# Altium footprint library Connector Power.PcbLib: 83 footprints (part 4 of 6)
Each footprint in its own frame and in the unit in brackets; x right, y up, seen from the top. Pads: shape width x height; smd on the part's side, far side on the other; paste and mask are expansions set on the pad; w line width, h text height; cw(c..) or ccw(c..) is an arc to the next point about the centre after c.
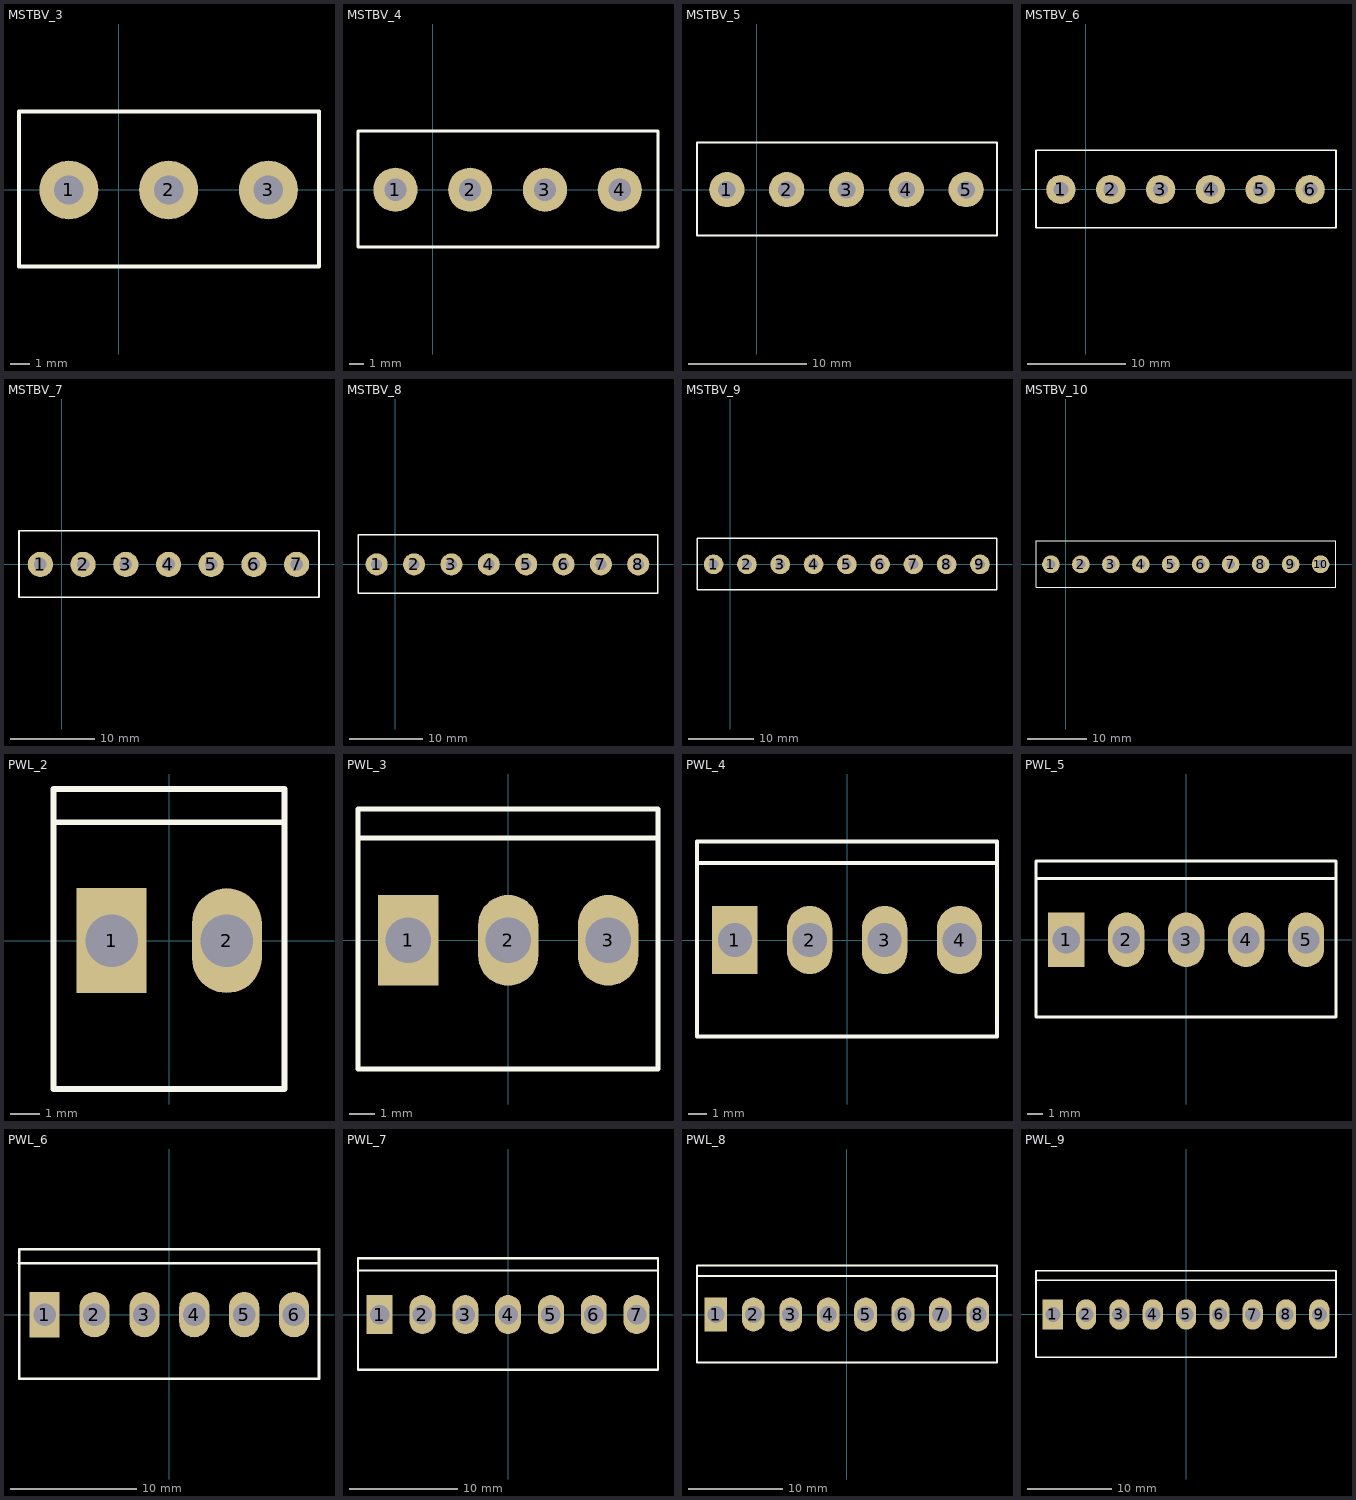
[diagram p3: the footprints below, top view; thin cyan lines are the x and y axes]

## MSTBV_3 [mm] "PHOENIX MSTBV 2.5/3-GF-5.08"
pads (3):
  round 3 hole 1.5: 1(-2.54,0) 2(2.54,0) 3(7.62,0)
Top Overlay:
  lines w0.2: -5.08,-3.9 10.2,-3.9 10.2,4 -5.08,4 -5.08,-3.9
3D body "1753437.stp": height 12.1, standoff -3.8, extent 0.08,-3.8 10.08,4.8
3D body "1753437.stp": height 12.1, standoff -3.8, extent -5,-3.8 5,4.8

## MSTBV_4 [mm] "PHOENIX MSTBV 2.5/4-GF-5.08"
pads (4):
  round 3 hole 1.5: 1(-2.54,0) 2(2.54,0) 3(7.62,0) 4(12.7,0)
Top Overlay:
  lines w0.2: -5.08,-3.9 15.3,-3.9 15.3,4 -5.08,4 -5.08,-3.9
3D body "1753437.stp": height 12.1, standoff -3.8, extent 0.08,-3.8 10.08,4.8
3D body "1753437.stp": height 12.1, standoff -3.8, extent -5,-3.8 5,4.8
3D body "1753437.stp": height 12.1, standoff -3.8, extent 5.16,-3.8 15.16,4.8

## MSTBV_5 [mm] "PHOENIX MSTBV 2.5/5-GF-5.08"
pads (5):
  round 3 hole 1.5: 1(-2.54,0) 2(2.54,0) 3(7.62,0) 4(12.7,0) 5(17.78,0)
Top Overlay:
  lines w0.2: -5.08,-3.9 -5.08,4 20.4,4 20.4,-3.9 -5.08,-3.9
3D body "1753437.stp": height 12.1, standoff -3.8, extent 10.24,-3.8 20.24,4.8
3D body "1753437.stp": height 12.1, standoff -3.8, extent 5.16,-3.8 15.16,4.8
3D body "1753437.stp": height 12.1, standoff -3.8, extent -5,-3.8 5,4.8
3D body "1753437.stp": height 12.1, standoff -3.8, extent 0.08,-3.8 10.08,4.8

## MSTBV_6 [mm] "PHOENIX MSTBV 2.5/6-GF-5.08"
pads (6):
  round 3 hole 1.5: 1(-2.54,0) 2(2.54,0) 3(7.62,0) 4(12.7,0) 5(17.78,0) 6(22.86,0)
Top Overlay:
  lines w0.2: -5.08,-3.9 25.5,-3.9 25.5,4 -5.08,4 -5.08,-3.9
3D body "1753437.stp": height 12.1, standoff -3.8, extent 0.08,-3.8 10.08,4.8
3D body "1753437.stp": height 12.1, standoff -3.8, extent -5,-3.8 5,4.8
3D body "1753437.stp": height 12.1, standoff -3.8, extent 5.16,-3.8 15.16,4.8
3D body "1753437.stp": height 12.1, standoff -3.8, extent 10.24,-3.8 20.24,4.8
3D body "1753437.stp": height 12.1, standoff -3.8, extent 15.32,-3.8 25.32,4.8

## MSTBV_7 [mm] "PHOENIX MSTBV 2.5/7-GF-5.08"
pads (7):
  round 3 hole 1.5: 1(-2.54,0) 2(2.54,0) 3(7.62,0) 4(12.7,0) 5(17.78,0) 6(22.86,0) 7(27.94,0)
Top Overlay:
  lines w0.2: -5.08,-3.9 30.6,-3.9 30.6,4 -5.08,4 -5.08,-3.9
3D body "1753437.stp": height 12.1, standoff -3.8, extent 20.4,-3.8 30.4,4.8
3D body "1753437.stp": height 12.1, standoff -3.8, extent 0.08,-3.8 10.08,4.8
3D body "1753437.stp": height 12.1, standoff -3.8, extent -5,-3.8 5,4.8
3D body "1753437.stp": height 12.1, standoff -3.8, extent 5.16,-3.8 15.16,4.8
3D body "1753437.stp": height 12.1, standoff -3.8, extent 10.24,-3.8 20.24,4.8
3D body "1753437.stp": height 12.1, standoff -3.8, extent 15.32,-3.8 25.32,4.8

## MSTBV_8 [mm] "PHOENIX MSTBV 2.5/8-GF-5.08"
pads (8):
  round 3 hole 1.5: 1(-2.54,0) 2(2.54,0) 3(7.62,0) 4(12.7,0) 5(17.78,0) 6(22.86,0) 7(27.94,0) 8(33.02,0)
Top Overlay:
  lines w0.2: -5.08,-3.9 -5.08,4 35.7,4 35.7,-3.9 -5.08,-3.9
3D body "1753437.stp": height 12.1, standoff -3.8, extent 25.48,-3.8 35.48,4.8
3D body "1753437.stp": height 12.1, standoff -3.8, extent 15.32,-3.8 25.32,4.8
3D body "1753437.stp": height 12.1, standoff -3.8, extent 10.24,-3.8 20.24,4.8
3D body "1753437.stp": height 12.1, standoff -3.8, extent 5.16,-3.8 15.16,4.8
3D body "1753437.stp": height 12.1, standoff -3.8, extent -5,-3.8 5,4.8
3D body "1753437.stp": height 12.1, standoff -3.8, extent 0.08,-3.8 10.08,4.8
3D body "1753437.stp": height 12.1, standoff -3.8, extent 20.4,-3.8 30.4,4.8

## MSTBV_9 [mm] "PHOENIX MSTBV 2.5/9-GF-5.08"
pads (9):
  round 3 hole 1.5: 1(-2.54,0) 2(2.54,0) 3(7.62,0) 4(12.7,0) 5(17.78,0) 6(22.86,0) 7(27.94,0) 8(33.02,0) 9(38.1,0)
Top Overlay:
  lines w0.2: -5.08,-3.9 -5.08,4 40.7,4 40.7,-3.9 -5.08,-3.9
3D body "1753437.stp": height 12.1, standoff -3.8, extent 25.48,-3.8 35.48,4.8
3D body "1753437.stp": height 12.1, standoff -3.8, extent 15.32,-3.8 25.32,4.8
3D body "1753437.stp": height 12.1, standoff -3.8, extent 10.24,-3.8 20.24,4.8
3D body "1753437.stp": height 12.1, standoff -3.8, extent 5.16,-3.8 15.16,4.8
3D body "1753437.stp": height 12.1, standoff -3.8, extent -5,-3.8 5,4.8
3D body "1753437.stp": height 12.1, standoff -3.8, extent 0.08,-3.8 10.08,4.8
3D body "1753437.stp": height 12.1, standoff -3.8, extent 20.4,-3.8 30.4,4.8
3D body "1753437.stp": height 12.1, standoff -3.8, extent 30.56,-3.8 40.56,4.8

## MSTBV_10 [mm] "PHOENIX MSTBV 2.5/10-GF-5.08"
pads (10):
  round 3 hole 1.5: 1(-2.54,0) 2(2.54,0) 3(7.62,0) 4(12.7,0) 5(17.78,0) 6(22.86,0) 7(27.94,0) 8(33.02,0) 9(38.1,0) 10(43.18,0)
Top Overlay:
  lines w0.2: -5.08,-3.9 -5.08,4 45.8,4 45.8,-3.9 -5.08,-3.9
3D body "1753437.stp": height 12.1, standoff -3.8, extent 35.64,-3.8 45.64,4.8
3D body "1753437.stp": height 12.1, standoff -3.8, extent 25.48,-3.8 35.48,4.8
3D body "1753437.stp": height 12.1, standoff -3.8, extent 15.32,-3.8 25.32,4.8
3D body "1753437.stp": height 12.1, standoff -3.8, extent 10.24,-3.8 20.24,4.8
3D body "1753437.stp": height 12.1, standoff -3.8, extent 5.16,-3.8 15.16,4.8
3D body "1753437.stp": height 12.1, standoff -3.8, extent -5,-3.8 5,4.8
3D body "1753437.stp": height 12.1, standoff -3.8, extent 0.08,-3.8 10.08,4.8
3D body "1753437.stp": height 12.1, standoff -3.8, extent 20.4,-3.8 30.4,4.8
3D body "1753437.stp": height 12.1, standoff -3.8, extent 30.56,-3.8 40.56,4.8

## PWL_2 [mm] "Connector; Header; 2 Position"
height 0.001
pads (2):
  rect 2.4x3.6 hole 1.8: 1(-1.98,0)
  oval 2.4x3.6 hole 1.8: 2(1.98,0)
Top Overlay:
  lines w0.2: -3.98,4.064 3.96,4.064 ; -3.98,-5.1 3.96,-5.1 3.96,5.207 -3.98,5.207 -3.98,-5.1
3D body "PWL-2.stp": height 13.5, standoff -4, extent -3.96,-5 3.96,5

## PWL_3 [mm] "Connector; Header; 3 Position"
height 0.001
pads (3):
  rect 2.4x3.6 hole 1.8: 1(-3.96,0)
  oval 2.4x3.6 hole 1.8: 2(0,0) 3(3.96,0)
Top Overlay:
  lines w0.2: -5.96,4.064 5.94,4.064 ; -5.96,-5.1 5.94,-5.1 5.94,5.207 -5.96,5.207 -5.96,-5.1
3D body "PWL-3.stp": height 13.5, standoff -4, extent -5.94,-5 5.94,5

## PWL_4 [mm] "Connector; Header; 4 Position"
height 0.001
pads (4):
  rect 2.4x3.6 hole 1.8: 1(-5.94,0)
  oval 2.4x3.6 hole 1.8: 2(-1.98,0) 3(1.98,0) 4(5.94,0)
Top Overlay:
  lines w0.2: -7.94,4.064 7.92,4.064 ; -7.94,-5.1 -7.94,5.207 7.92,5.207 7.92,-5.1 -7.94,-5.1
3D body "PWL-4.stp": height 13.5, standoff -4, extent -7.92,-5 7.92,5

## PWL_5 [mm] "Connector; Header; 5 Position"
height 0.001
pads (5):
  rect 2.4x3.6 hole 1.8: 1(-7.92,0)
  oval 2.4x3.6 hole 1.8: 2(-3.96,0) 3(0,0) 4(3.96,0) 5(7.92,0)
Top Overlay:
  lines w0.2: -9.92,4.064 9.9,4.064 ; -9.92,-5.1 -9.92,5.207 9.9,5.207 9.9,-5.1 -9.92,-5.1
3D body "PWL-5.stp": height 13.5, standoff -4, extent -9.9,-5 9.9,5

## PWL_6 [mm] "Connector; Header; 6 Position"
height 0.001
pads (6):
  rect 2.4x3.6 hole 1.8: 1(-9.9,0)
  oval 2.4x3.6 hole 1.8: 2(-5.94,0) 3(-1.98,0) 4(1.98,0) 5(5.94,0) 6(9.9,0)
Top Overlay:
  lines w0.2: -11.932,4.064 11.88,4.064 ; -11.9,-5.1 -11.9,5.207 11.88,5.207 11.88,-5.1 -11.9,-5.1
3D body "PWL-6.stp": height 13.5, standoff -4, extent -11.88,-5 11.88,5

## PWL_7 [mm] "Connector; Header; 7 Position"
height 0.001
pads (7):
  rect 2.4x3.6 hole 1.8: 1(-11.88,0)
  oval 2.4x3.6 hole 1.8: 2(-7.92,0) 3(-3.96,0) 4(0,0) 5(3.96,0) 6(7.92,0) 7(11.88,0)
Top Overlay:
  lines w0.2: -13.88,4.064 13.86,4.064 ; -13.88,-5.1 -13.88,5.207 13.86,5.207 13.86,-5.1 -13.88,-5.1
3D body "PWL-7.stp": height 13.5, standoff -4, extent -13.86,-5 13.86,5

## PWL_8 [mm] "Connector; Header; 8 Position"
height 0.001
pads (8):
  rect 2.4x3.6 hole 1.8: 1(-13.86,0)
  oval 2.4x3.6 hole 1.8: 2(-9.9,0) 3(-5.94,0) 4(-1.98,0) 5(1.98,0) 6(5.94,0) 7(9.9,0) 8(13.86,0)
Top Overlay:
  lines w0.2: -15.86,4.064 15.89,4.064 ; -15.86,-5.1 -15.86,5.207 15.89,5.207 15.89,-5.1 -15.86,-5.1
3D body "PWL-8.stp": height 13.5, standoff -4, extent -15.822,-4.92 15.858,5.08

## PWL_9 [mm] "Connector; Header; 9 Position"
height 0.001
pads (9):
  rect 2.4x3.6 hole 1.8: 1(-15.84,0)
  oval 2.4x3.6 hole 1.8: 2(-11.88,0) 3(-7.92,0) 4(-3.96,0) 5(0,0) 6(3.96,0) 7(7.92,0) 8(11.88,0) 9(15.84,0)
Top Overlay:
  lines w0.2: -17.84,4.064 17.82,4.064 ; -17.84,-5.1 -17.84,5.207 17.82,5.207 17.82,-5.1 -17.84,-5.1
3D body "PWL-9.stp": height 13.5, standoff -4, extent -17.82,-5 17.82,5